# EAGLE library part PN7161 (library orb)
NXP PN7161A1HN NFC controller (I2C)
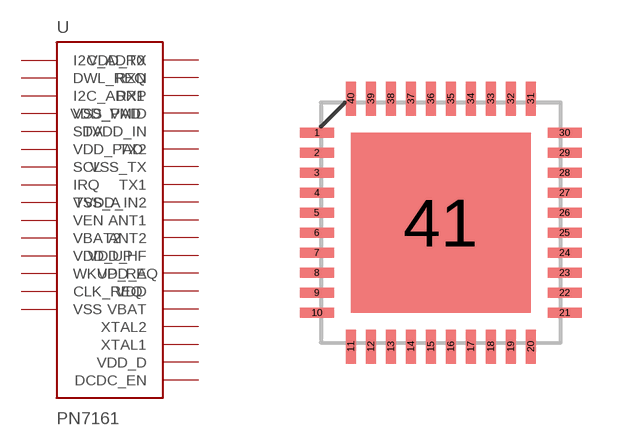
[diagram p1: symbol with the pads of HVQFN40_6X6; footprint HVQFN40_6X6]

Designator prefix U

## PN7161  [HVQFN40_6X6]
1  I2C_ADR0  pas
2  DWL_REQ  pas
3  I2C_ADR1  pas
4  VSS_PAD  pas
5  SDA  pas
6  VDD_PAD  pas
7  SCL  pas
8  IRQ  pas
9  VSS_A  pas
10  VEN  pas
12  VBAT2  pas
13  VDD_UP  pas
14  VDD_TX  pas
15  RXN  pas
16  RXP  pas
17  VDD_VMID  pas
18  TVDD_IN  pas
19  TX2  pas
20  VSS_TX  pas
21  TX1  pas
22  TVDD_IN2  pas
23  ANT1  pas
24  ANT2  pas
25  VDD_HF  pas
26  VDD_A  pas
27  VDD  pas
28  VBAT  pas
29  XTAL2  pas
30  XTAL1  pas
31  VDD_D  pas
37  DCDC_EN  pas
39  WKUP_REQ  pas
40  CLK_REQ  pas
41  VSS  pas

## Footprint HVQFN40_6X6 (pad centres in mm)
HVQFN40 6 x 6 mm, 0.5 mm pitch, exposed pad 4.5 x 4.5 (SOT618-1). IPC-style pads: verify against the NXP land pattern
smd 0.85 x 0.25: 1 -3.1,2.25; 2 -3.1,1.75; 3 -3.1,1.25; 4 -3.1,0.75; 5 -3.1,0.25; 6 -3.1,-0.25; 7 -3.1,-0.75; 8 -3.1,-1.25; 9 -3.1,-1.75; 10 -3.1,-2.25; 21 3.1,-2.25; 22 3.1,-1.75; 23 3.1,-1.25; 24 3.1,-0.75; 25 3.1,-0.25; 26 3.1,0.25; 27 3.1,0.75; 28 3.1,1.25; 29 3.1,1.75; 30 3.1,2.25
smd 0.25 x 0.85: 11 -2.25,-3.1; 12 -1.75,-3.1; 13 -1.25,-3.1; 14 -0.75,-3.1; 15 -0.25,-3.1; 16 0.25,-3.1; 17 0.75,-3.1; 18 1.25,-3.1; 19 1.75,-3.1; 20 2.25,-3.1; 31 2.25,3.1; 32 1.75,3.1; 33 1.25,3.1; 34 0.75,3.1; 35 0.25,3.1; 36 -0.25,3.1; 37 -0.75,3.1; 38 -1.25,3.1; 39 -1.75,3.1; 40 -2.25,3.1
smd 4.5 x 4.5: 41 0,0